# Altium schematic symbol library TPS54538RQFR.SchLib: 1 symbol
Pins are listed as number, name and electrical type; pins without a type are passive.

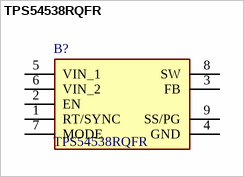
[diagram p0: symbol TPS54538RQFR]

## TPS54538RQFR
designator B?
3.8-V to 28-V, 5-A, 200-kHz to 2.2-MHz, synchronous buck converter; Manufacturer_Name: Texas Instruments; Geometry.Height: 1mm; Manufacturer_Part_Number: TPS54538RQFR; Mouser Part Number: 595-TPS54538RQFR; Mouser Price/Stock: https://www.mouser.co.uk/ProductDetail/Texas-Instruments/TPS54538RQFR?qs=7%2F6SraaimPQbX%2F0LGeEMWA%3D%3D; Arrow Part Number: TPS54538RQFR; Arrow Price/Stock: https://www.arrow.com/en/products/tps54538rqfr/texas-instruments.html?utm_currency=USD&region=nac; Datasheet Link: https://www.ti.com/product/TPS54538/part-details/TPS54538RQFR?utm_source=google&utm_medium=cpc&utm_campaign=ocb-tistore-null-app_opn_en-cpc-storeic-google-soas_en_pur&utm_content=Device&ds_k=TPS54538RQFR&DCM=yes&gad_source=1&gclid=Cj0KCQjwhMq-BhCFARIsAGvo
footprint TPS54538RQFR
pins: 1 RT/SYNC, 2 EN, 3 FB, 4 GND, 5 VIN_1, 6 VIN_2, 7 MODE, 8 SW, 9 SS/PG